# Altium footprint library Discrete.PcbLib: 6 footprints
Each footprint in its own frame and in the unit in brackets; x right, y up, seen from the top. Pads: shape width x height; smd on the part's side, far side on the other; paste and mask are expansions set on the pad; w line width, h text height; cw(c..) or ccw(c..) is an arc to the next point about the centre after c.
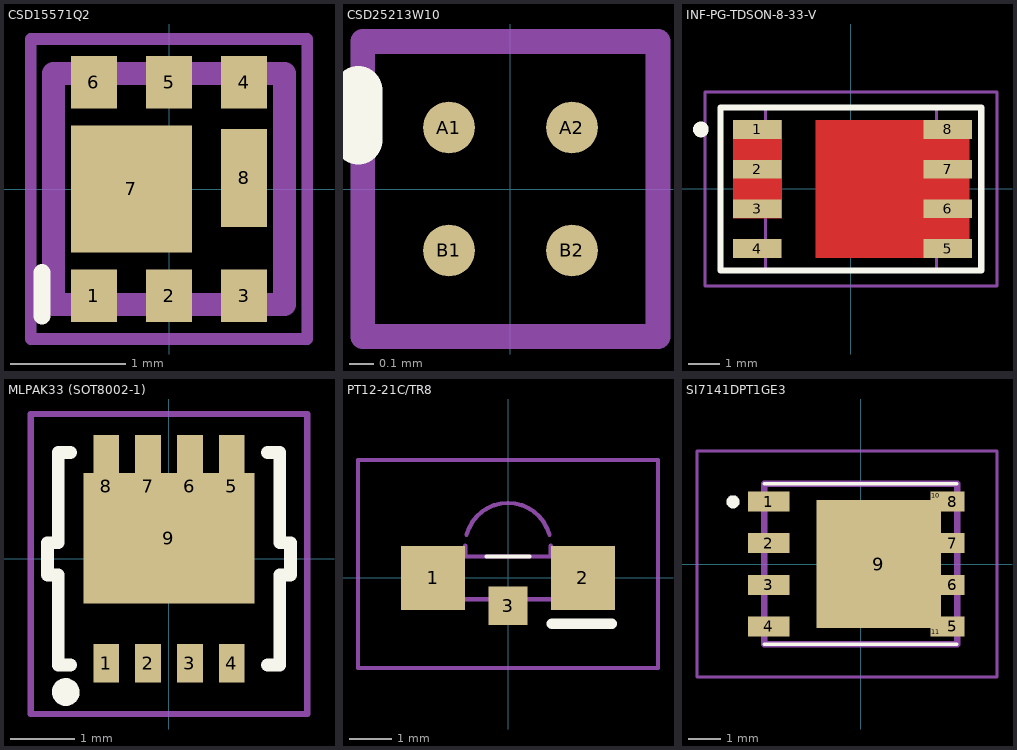
[diagram p0: the footprints below, top view; thin cyan lines are the x and y axes]

## CSD15571Q2 [mm]
pads (8):
  rect 0.4x0.455 smd mask+0.035: 1(-0.65,-0.923) 2(0,-0.923) 3(0.65,-0.923) 4(0.65,0.923) 5(0,0.923) 6(-0.65,0.923)
  rect 1.05x1.1 smd mask+0.035: 7(-0.325,0.001)
  rect 0.4x0.85 smd mask+0.035: 8(0.65,0.096)
Top Overlay:
  lines w0.15: -1.1,-1.1 -1.1,-0.725
M13 (CMP_Body_OTL_Top):
  lines w0.2: -1,-1 -1,1 1,1 1,-1 -1,-1
M15 (CMP_Courtyard_Top):
  lines w0.1: -1.2,-1.3 1.2,-1.3 1.2,1.3 -1.2,1.3 -1.2,-1.3
3D body "CSD15571Q2.stp": height 0.8, standoff 0, extent -1,-1 1,1

## CSD25213W10 [mm] "2x2 BGA 1mm^2"
pads (4):
  round 0.21 smd mask+0.05: A1(-0.25,0.25) A2(0.25,0.25) B1(-0.25,-0.25) B2(0.25,-0.25)
Top Overlay:
  lines w0.2: -0.62,0.2 -0.62,0.4
M15 (CMP_Courtyard_Top):
  lines w0.1: -0.6,-0.6 0.6,-0.6 0.6,0.6 -0.6,0.6 -0.6,-0.6
3D body "CSD25213W10.step": height 0.62, standoff 0, extent -0.5,-0.5 0.5,0.5

## INF-PG-TDSON-8-33-V [mm] "TDSON 8, 1.27mm pitch; 8 pin,5.15mm W X 5.48mm L X 1.10mm H body"
height 1.1
pads (8):
  rect 1.55x0.6 smd paste-1.55 mask+0: 1(-2.995,1.905) 2(-2.995,0.635) 3(-2.995,-0.635) 4(-2.995,-1.905)
  rect 1.55x0.6 smd paste-1.35 mask+0: 5(3.1,-1.905) 6(3.1,-0.635) 7(3.1,0.635) 8(3.1,1.905)
Top Layer:
  region: 3.775,2.205 3.775,-2.205 -1.125,-2.205 -1.125,2.205
  region: -2.22,2.205 -2.22,-0.935 -3.77,-0.935 -3.77,2.205 -2.995,2.205
Top Overlay:
  circle w0.25: c-4.8,1.905 r0.125
  lines w0.2: -4.17,-2.605 4.17,-2.605 4.17,2.605 -4.17,2.605 -4.17,-2.605
Top Paste:
  region: 2.24,-1.6 0.74,-1.6 0.74,-0.1 2.24,-0.1
  region: -0.96,0.1 -0.96,1.6 0.54,1.6 0.54,0.1
  region: -0.96,-1.6 -0.96,-0.1 0.54,-0.1 0.54,-1.6
  region: 2.24,1.6 2.24,0.1 0.74,0.1 0.74,1.6
  region: 3.72,2.155 3.72,1.655 2.52,1.655 2.52,2.155
  region: 3.72,0.885 3.72,0.385 2.52,0.385 2.52,0.885
  region: 3.72,-0.385 3.72,-0.885 2.52,-0.885 2.52,-0.385
  region: 3.72,-1.655 3.72,-2.155 2.52,-2.155 2.52,-1.655
  region: -2.32,-0.037 -2.32,-0.887 -2.77,-0.887 -2.77,-0.037
  region: -2.32,1.059 -2.32,0.209 -2.77,0.209 -2.77,1.059
  region: -2.32,2.155 -2.32,1.305 -2.77,1.305 -2.77,2.155
  region: -2.52,-1.655 -2.52,-2.155 -3.72,-2.155 -3.72,-1.655
  region: -2.97,-0.385 -2.97,-0.885 -3.72,-0.885 -3.72,-0.385
  region: -2.97,0.885 -2.97,0.385 -3.72,0.385 -3.72,0.885
  region: -2.97,2.155 -2.97,1.655 -3.72,1.655 -3.72,2.155
Top Solder:
  region: -2.835,2.205 -2.22,2.205 -2.22,-0.935 -2.835,-0.935
  region: -1.125,2.205 2.425,2.205 2.425,-2.205 -1.125,-2.205
M3 (ASY_Text_Top):
  text ".DESIGNATOR" at 0,0 h1.2
M13 (CMP_Body_OTL_Top):
  lines w0.1: -2.74,-2.575 2.74,-2.575 2.74,2.575 -2.74,2.575 -2.74,-2.575
M15 (CMP_Courtyard_Top):
  lines w0.1: -0.5,0 0.5,0 ; 0,-0.5 0,0.5 ; -4.67,-3.105 4.67,-3.105 4.67,3.105 -4.67,3.105 -4.67,-3.105
3D body "PG-TDSON-8-33_C66065-A6557-C027-01-0004.stp": height 1.01, standoff 0, extent -3.22,-2.705 3.22,2.705

## MLPAK33 (SOT8002-1) [mm] "for PXN4R7-30QL / 30 V, N-channel Trench MOSFET"
pads (9):
  rect 0.4x0.6 smd: 1(-0.975,-1.625) 2(-0.325,-1.625) 3(0.325,-1.625) 4(0.975,-1.625)
  rect 0.4x1.6 smd mask-2539.97: 5(0.975,1.125) 6(0.325,1.125) 7(-0.325,1.125) 8(-0.975,1.125)
  rect 2.65x2.03 smd mask+0.102: 9(0,0.32)
Top Overlay:
  lines w0.2: -1.53,-1.65 -1.72,-1.65 -1.72,-0.25 -1.886,-0.25 -1.886,0.25 -1.72,0.25 -1.72,1.65 -1.53,1.65 ; 1.53,-1.65 1.72,-1.65 1.72,-0.25 1.886,-0.25 1.886,0.25 1.72,0.25 1.72,1.65 1.53,1.65
  lines w0.254: -1.516,-2.07 cw(c-1.604,-2.07) -1.516,-2.064
Top Solder:
  region: -1.277,1.325 -1.277,2.027 -0.673,2.027 -0.673,1.325
  region: -0.627,1.325 -0.627,2.027 -0.023,2.027 -0.023,1.325
  region: 0.023,1.325 0.023,2.027 0.627,2.027 0.627,1.325
  region: 0.673,1.325 0.673,2.027 1.277,2.027 1.277,1.325
M15 (CMP_Courtyard_Top):
  lines w0.1: -2.15,-2.411 2.15,-2.411 2.15,2.25 -2.15,2.25 -2.15,-2.411
3D body "PXN4R7-30QL v6.step": height 0.9, standoff 0, extent -1.75,-1.81 1.75,1.81

## PT12-21C/TR8 [mm] "Footprint compatible with APA3010SEC, but with cathode mark on pin 2"
pads (3):
  rect 1.5x1.5 smd: 1(-1.75,0) 2(1.75,0)
  rect 0.9x0.9 smd: 3(0,-0.65)
Top Overlay:
  lines w0.1: -0.5,0.5 0.5,0.5
  lines w0.254: 1.023,-1.07 1.373,-1.07 2.071,-1.07 2.42,-1.07
M13 (CMP_Body_OTL_Top):
  lines w0.1: -1,0.5 -1,0.75 ; -0.966,1.009 cw(c0,0.75) 0.966,1.009 ; 1,0.5 1,0.75 ; -1.5,-0.5 1.5,-0.5 1.5,0.5 -1.5,0.5 -1.5,-0.5
M15 (CMP_Courtyard_Top):
  lines w0.1: -3.5,-2.1 3.5,-2.1 3.5,2.75 -3.5,2.75 -3.5,-2.1
3D body "APA3010SEC v2.step": height 1, standoff 0, extent -1.525,-0.374 1.525,1.651

## SI7141DPT1GE3 [mm]
pads (11):
  rect 1.27x0.61 smd: 1(-2.81,1.905) 2(-2.81,0.635) 3(-2.81,-0.635) 4(-2.81,-1.905)
  rect 0.71x0.61 smd: 5(2.81,-1.905) 6(2.81,-0.635) 7(2.81,0.635) 8(2.81,1.905)
  rect 3.81x3.91 smd: 9(0.55,0)
  rect 0.32x0.255 smd: 10(2.3,2.083) 11(2.3,-2.083)
Top Overlay:
  lines w0.1: -2.945,-2.45 2.945,-2.45 ; -2.945,2.45 2.945,2.45
  lines w0.2: -3.9,1.8 cw(c-3.9,1.9) -3.9,2 cw(c-3.9,1.9) -3.9,1.8
M13 (CMP_Body_OTL_Top):
  lines w0.2: -2.945,-2.45 2.945,-2.45 2.945,2.45 -2.945,2.45 -2.945,-2.45
M15 (CMP_Courtyard_Top):
  lines w0.1: -5,-3.45 4.165,-3.45 4.165,3.45 -5,3.45 -5,-3.45
3D body "SI7141DP-T1-GE3.STEP": height 1.12, standoff 0, extent -3.219,-2.599 2.927,2.557